# EAGLE library part IC_BUFF_SN74LVC1T45DBV (library dp_devices.v6)
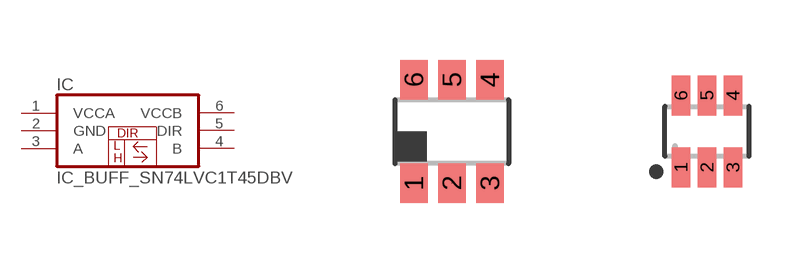
[diagram p25: symbol with the pads of DBV-R-PDSO-G6; footprints DBV-R-PDSO-G6, SC-70-6]

Designator prefix IC

## IC_BUFF_SN74LVC1T45DBV  [DBV-R-PDSO-G6]
1  VCCA  pwr
2  GND  pwr
3  A
4  B
5  DIR  in
6  VCCB  pwr

## IC_BUFF_SN74LVC1T45DBV-SC-70-6  [SC-70-6]
Pads as for DBV-R-PDSO-G6

## IC_BUFF_SN74LVC1T45DBV-EXTENDED  [SC-70-6_EXTENDED_PADS]
Pads as for DBV-R-PDSO-G6

## Footprint DBV-R-PDSO-G6 (pad centres in mm)
smd 0.69 x 0.99: 1 -0.95,-1.29; 2 0,-1.29; 3 0.95,-1.29; 4 0.95,1.3; 5 0,1.3; 6 -0.95,1.3

## Footprint SC-70-6 (pad centres in mm)
smd 0.47 x 1: 1 -0.65,-0.9; 2 0,-0.9; 3 0.65,-0.9; 4 0.65,0.9; 5 0,0.9; 6 -0.65,0.9

## Footprint SC-70-6_EXTENDED_PADS (pad centres in mm)
smd 0.47 x 2: 1 -0.65,-1.4; 2 0,-1.4; 3 0.65,-1.4; 4 0.65,1.4; 5 0,1.4; 6 -0.65,1.4